# EAGLE library part BQ51003YFPT (library BQ51003YFPT)
BQ51003 Wireless Power Receiver Source: Datasheet <http://www.ti.com/lit/gpn/BQ51003>
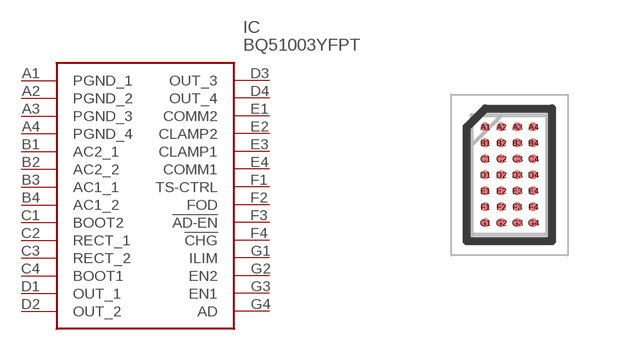
[diagram p0: symbol with the pads of BGA28C40P4X7_188X301X50; footprint BGA28C40P4X7_188X301X50]

Designator prefix IC

## BQ51003YFPT (Description: BQ51003 Wireless Power Receiver; Height: 0.5mm; Manufacturer_Name: Texas Instruments; Manufacturer_Part_Number: BQ51003YFPT; Mouser_Part_Number: 595-BQ51003YFPT; Mouser_Price-Stock: https://www.mouser.co.uk/ProductDetail/Texas-Instruments/BQ51003YFPT?qs=QCUnHQQYO1rX6GZ4rUhwCg%3D%3D)  [BGA28C40P4X7_188X301X50]
A1  PGND_1
A2  PGND_2
A3  PGND_3
A4  PGND_4
B1  AC2_1
B2  AC2_2
B3  AC1_1
B4  AC1_2
C1  BOOT2
C2  RECT_1
C3  RECT_2
C4  BOOT1
D1  OUT_1
D2  OUT_2
D3  OUT_3
D4  OUT_4
E1  COMM2
E2  CLAMP2
E3  CLAMP1
E4  COMM1
F1  TS-CTRL
F2  FOD
F3  !AD-EN
F4  !CHG
G1  ILIM
G2  EN2
G3  EN1
G4  AD

## Footprint BGA28C40P4X7_188X301X50 (pad centres in mm)
YFP(R-XBGA-N28)
smd 0.226 x 0.226: A1 -0.6,1.2; A2 -0.2,1.2; A3 0.2,1.2; A4 0.6,1.2; B1 -0.6,0.8; B2 -0.2,0.8; B3 0.2,0.8; B4 0.6,0.8; C1 -0.6,0.4; C2 -0.2,0.4; C3 0.2,0.4; C4 0.6,0.4; D1 -0.6,0; D2 -0.2,0; D3 0.2,0; D4 0.6,0; E1 -0.6,-0.4; E2 -0.2,-0.4; E3 0.2,-0.4; E4 0.6,-0.4; F1 -0.6,-0.8; F2 -0.2,-0.8; F3 0.2,-0.8; F4 0.6,-0.8; G1 -0.6,-1.2; G2 -0.2,-1.2; G3 0.2,-1.2; G4 0.6,-1.2